# Altium footprint library KCD11-101N.PcbLib: 1 footprints
Each footprint in its own frame and in the unit in brackets; x right, y up, seen from the top. Pads: shape width x height; smd on the part's side, far side on the other; paste and mask are expansions set on the pad; w line width, h text height; cw(c..) or ccw(c..) is an arc to the next point about the centre after c.
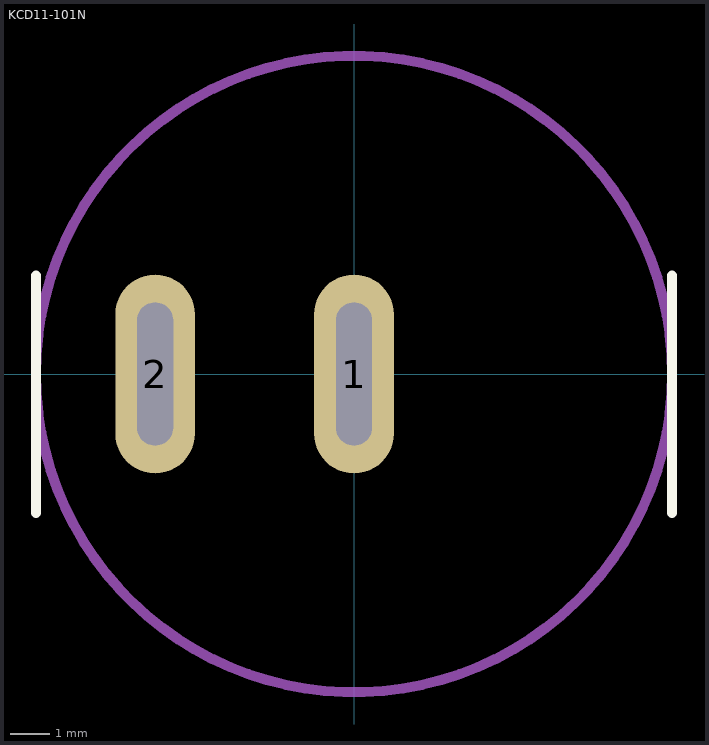
[diagram p0: the footprint, top view; thin cyan lines are the x and y axes]

## KCD11-101N [mm] "Rocket Switch SPST"
pads (2):
  oval 2x5 hole 0.9 slot 3.6 at 90 deg: 1(0,0) 2(-5,0)
Top Overlay:
  lines w0.254: -8,-3.492 -8,2.476 ; 8,-3.492 8,2.476
Mechanical 1:
  circle w0.254: c0,0 r8